# Altium schematic symbol library CONVERTERS.SchLib: 1 symbol
Pins are listed as number, name and electrical type; pins without a type are passive.

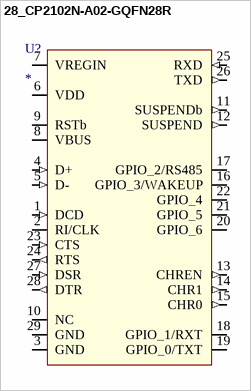
[diagram p0: symbol 28_CP2102N-A02-GQFN28R]

## 28_CP2102N-A02-GQFN28R
designator U?
USB->UART, Vb: 3V-3.6V, USB2.0,3MBs; Supplier 1: Farnell; Supplier Part Number 1: CP2102N-A02-GQFN28R
footprint QFN-28_CP2102N-A02-GQFN28R (USB->UART, Vb: 3V-3.6V, USB2.0,3MBs)
pins: 1 DCD (in), 2 RI/CLK (io), 3 GND (power), 4 D+ (in), 5 D- (in), 6 VDD (power), 7 VREGIN (power), 8 VBUS (power), 9 RSTb, 10 NC, 11 SUSPENDb (out), 12 SUSPEND (out), 13 CHREN (out), 14 CHR1 (out), 15 CHR0 (out), 16 GPIO_3/WAKEUP (io), 17 GPIO_2/RS485 (io), 18 GPIO_1/RXT (io), 19 GPIO_0/TXT (io), 20 GPIO_6 (io), 21 GPIO_5 (io), 22 GPIO_4 (io), 23 CTS (in), 24 RTS (out), 25 RXD (in), 26 TXD (out), 27 DSR (in), 28 DTR (out), 29 GND (power)